# Altium footprint library FTP.PcbLib: 207 footprints (part 5 of 13)
Each footprint in its own frame and in the unit in brackets; x right, y up, seen from the top. Pads: shape width x height; smd on the part's side, far side on the other; paste and mask are expansions set on the pad; w line width, h text height; cw(c..) or ccw(c..) is an arc to the next point about the centre after c.
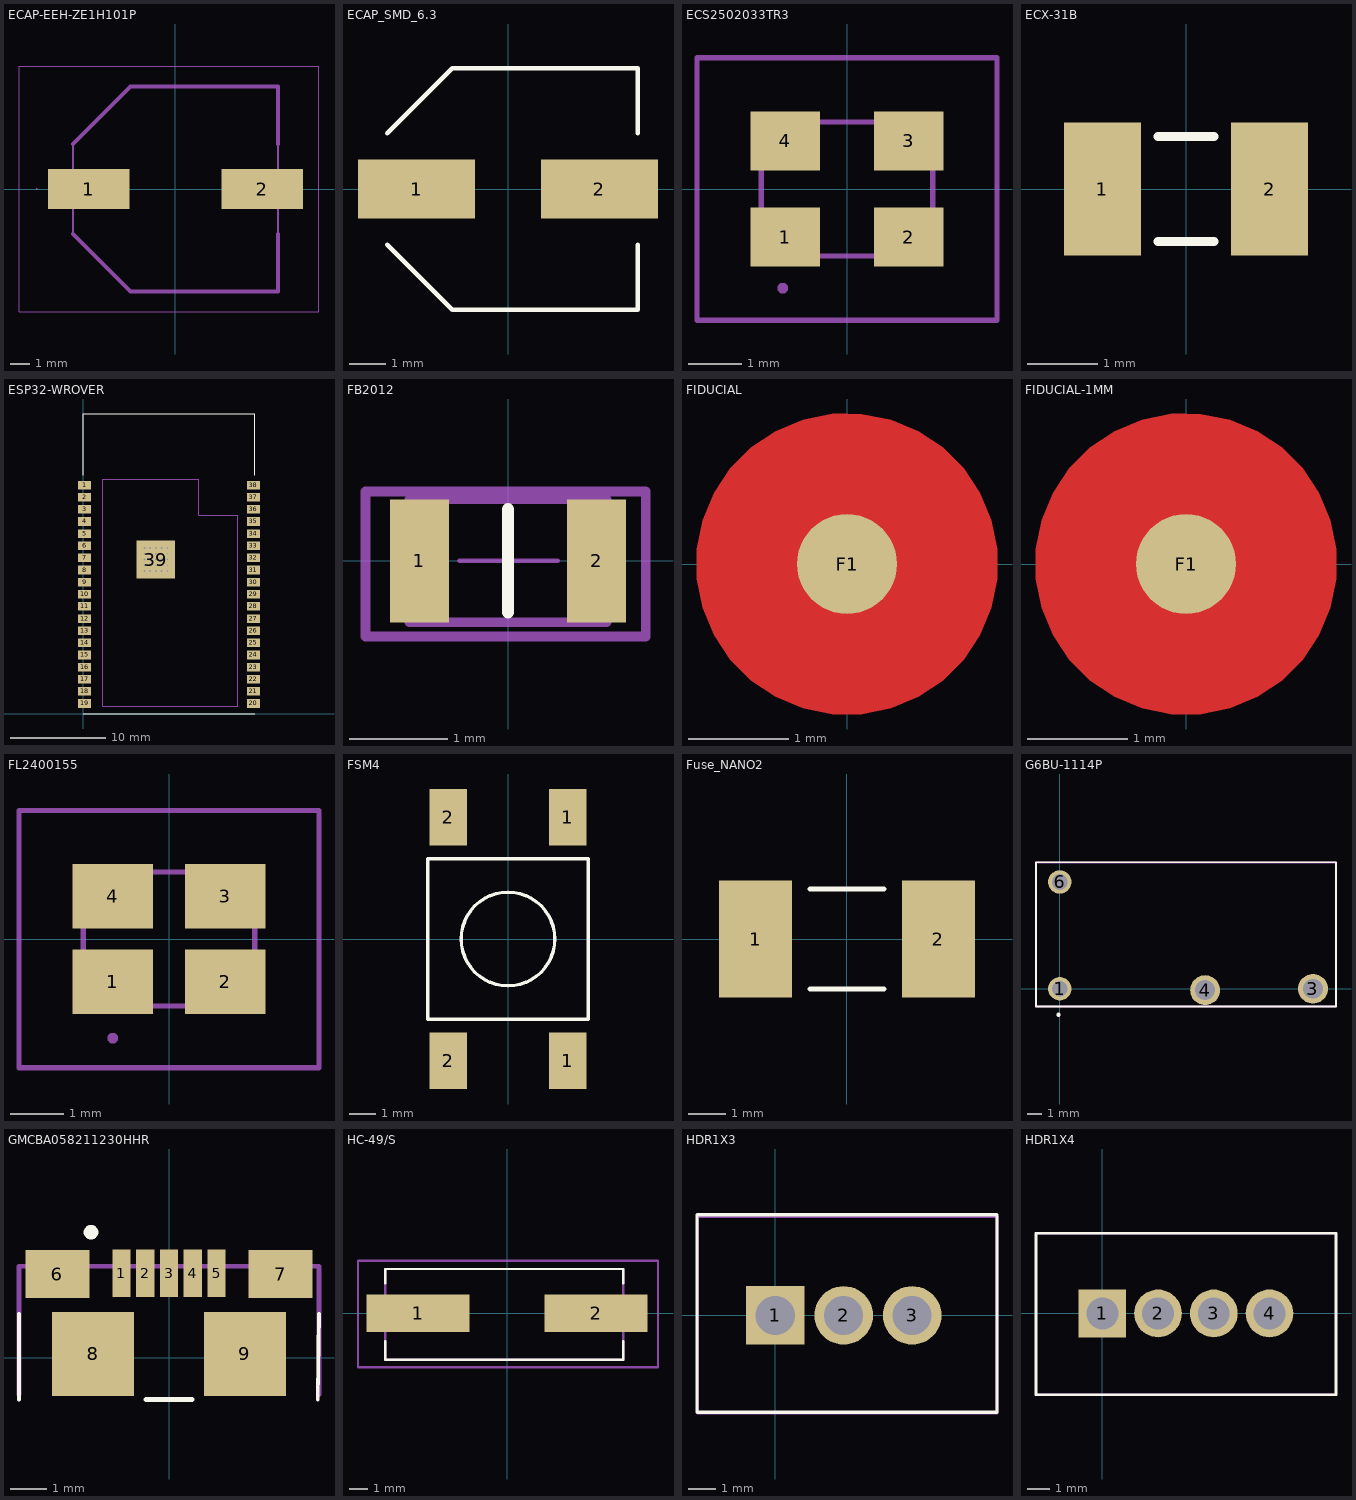
[diagram p4: the footprints below, top view; thin cyan lines are the x and y axes]

## ECAP-EEH-ZE1H101P [mm]
pads (2):
  rect 4.1x2 smd: 1(-4.35,0) 2(4.35,0)
3D Body Bottom:
  lines w0.05: -6.975,0 ccw(c-6.95,0) -6.925,0 ccw(c-6.95,0) -6.975,0
  lines w0.2: -5.15,-2.25 -2.25,-5.15 5.15,-5.15 5.15,-2.25 ; -5.15,2.25 -2.25,5.15 4.5,5.15 5.15,5.15 5.15,2.25
Bottom Assembly:
  lines w0.05: -7.85,-6.15 7.2,-6.15 7.2,6.15 -7.85,6.15 -7.85,-6.15
  lines w0.1: -5.15,2.25 -2.25,5.15 ; -5.15,2.25 -5.15,-2.25 -2.25,-5.15 5.15,-5.15 5.15,5.15 -2.25,5.15 ; -5.15,2.25 -2.25,5.15
3D body "PanasonicRadialCanSizeE.STEP": height 6.2, standoff -0.05, extent -4.246,-4.15 4.754,4.15

## ECAP_SMD_6.3 [mm]
pads (2):
  rect 3.2x1.6 smd: 1(-2.5,0) 2(2.5,0)
Top Overlay:
  lines w0.127: -3.3,-1.526 -1.526,-3.3 3.55,-3.3 3.55,-1.524 ; -3.3,1.526 -1.526,3.3 3.55,3.3 3.55,1.524
3D body "CAPSMD6_3x3_9.STEP": height 3.91, standoff 0, extent -3.48,-3.3 3.52,3.3

## ECS2502033TR3 [mm]
pads (4):
  rect 1.3x1.1 smd: 1(-1.15,-0.9) 2(1.15,-0.9) 3(1.15,0.9) 4(-1.15,0.9)
Assembly Bottom:
  lines w0.1: -2.8,-2.45 2.8,-2.45 2.8,2.45 -2.8,2.45 -2.8,-2.45 ; -1.6,-1.25 1.6,-1.25 1.6,1.25 -1.6,1.25 -1.6,-1.25
3D Body Bottom:
  lines w0.1: -1.2,-1.9 cw(c-1.2,-1.85) -1.2,-1.8 cw(c-1.2,-1.85) -1.2,-1.9
3D body "ECS-250-20-33-TR3.stp": height 0.9, standoff 0, extent -1.69,-1.34 1.69,1.34

## ECX-31B [mm]
pads (2):
  rect 1.1x1.9 smd mask+0.05: 1(-1.194,0) 2(1.194,0)
Top Overlay:
  lines w0.127: -0.4,-0.75 0.4,-0.75 ; -0.4,0.75 0.4,0.75
3D body "User Library-ECX-31B.STEP": height 0.9, standoff 0, extent -1.6,-0.737 1.6,0.764

## ESP32-WROVER [mm]
pads (64):
  rect 1.35x0.9 smd mask+0.07: 1(0.175,23.96) 2(0.175,22.69) 3(0.175,21.42) 4(0.175,20.15) 5(0.175,18.88) 6(0.175,17.61) 7(0.175,16.34) 8(0.175,15.07) 9(0.175,13.8) 10(0.175,12.53) 11(0.175,11.26) 12(0.175,9.99) 13(0.175,8.72) 14(0.175,7.45) 15(0.175,6.18) 16(0.175,4.91) 17(0.175,3.64) 18(0.175,2.37) 19(0.175,1.1) 20(17.825,1.1) 21(17.825,2.37) 22(17.825,3.64) 23(17.825,4.91) 24(17.825,6.18) 25(17.825,7.45) 26(17.825,8.72) 27(17.825,9.99) 28(17.825,11.26) 29(17.825,12.53) 30(17.825,13.8) 31(17.825,15.07) 32(17.825,16.34) 33(17.825,17.61) 34(17.825,18.88) 35(17.825,20.15) 36(17.825,21.42) 37(17.825,22.69) 38(17.825,23.96)
  round 0.3 hole 0.2 mask+0.07: 39(6.42,14.97) 39(6.42,15.57) 39(6.42,16.17) 39(6.42,16.77) 39(6.42,17.37) 39(7.02,14.97) 39(7.02,15.57) 39(7.02,16.17) 39(7.02,16.77) 39(7.02,17.37) 39(7.62,14.97) 39(7.62,15.57) 39(7.62,16.17) 39(7.62,16.77) 39(7.62,17.37) 39(8.22,14.97) 39(8.22,15.57) 39(8.22,16.17) 39(8.22,16.77) 39(8.22,17.37) 39(8.82,14.97) 39(8.82,15.57) 39(8.82,16.17) 39(8.82,16.77) 39(8.82,17.37)
  rect 4x4 smd mask+0.07: 39(7.62,16.17)
Top Overlay:
  lines w0.127: 0,0 18,0 ; 0,25 0,31.4 18,31.4 18,25
Mechanical 13:
  lines w0.127: 2.057,0.813 16.18,0.813 16.18,20.777 12.09,20.777 12.09,24.587 2.057,24.587 2.057,0.813
3D body "ESP32-WROVER-I--3DModel-STEP-56544.STEP": height 3.65, standoff 0, extent 0,0 18,31.4

## FB2012 [mm]
pads (2):
  rect 0.6x1.25 smd: 1(-0.9,0) 2(0.9,0)
Top Overlay:
  lines w0.127: 0,-0.525 0,0.525
Mechanical 13:
  lines w0.1: -1,-0.625 -1,0.625 1,0.625 1,-0.625 -1,-0.625
Mechanical 15:
  lines w0.05: -0.494,0 0.506,0 ; 0.006,-0.5 0.006,0.5
  lines w0.1: -1.449,-0.769 -1.449,0.704 1.4,0.704 1.4,-0.769 -1.449,-0.769
3D body "User Library-User Library-0805_Res1.STEP": height 0.8, standoff 0, extent -1.4,-0.625 1.4,0.625

## FIDUCIAL [mm] "1MM FIDUCAL MARKER"
pads (1):
  round 1 smd paste-1 mask+0.5: F1(0,0)
Top Layer:
  pour cut-out: -1.5,0 -1.5,-0.148 -1.442,-0.438 -1.329,-0.711 -1.165,-0.956 -0.956,-1.165 -0.711,-1.329 -0.438,-1.442 -0.148,-1.5 0,-1.5 0.148,-1.5 0.438,-1.442 0.711,-1.329 0.956,-1.165 1.165,-0.956 1.329,-0.711 1.442,-0.438 1.5,-0.148 1.5,0 1.5,0.148 1.442,0.438 1.329,0.711 1.165,0.956 0.956,1.165 0.711,1.329 0.438,1.442 0.148,1.5 0,1.5 -0.148,1.5 -0.438,1.442 -0.711,1.329 -0.956,1.165 -1.165,0.956 -1.329,0.711 -1.442,0.438 -1.5,0.148

## FIDUCIAL-1MM [mm] "1MM FIDUCAL MARKER"
pads (1):
  round 1 smd paste-1 mask+0.5: F1(0,0)
Top Layer:
  pour cut-out: -1.5,0 -1.5,-0.148 -1.442,-0.438 -1.329,-0.711 -1.165,-0.956 -0.956,-1.165 -0.711,-1.329 -0.438,-1.442 -0.148,-1.5 0,-1.5 0.148,-1.5 0.438,-1.442 0.711,-1.329 0.956,-1.165 1.165,-0.956 1.329,-0.711 1.442,-0.438 1.5,-0.148 1.5,0 1.5,0.148 1.442,0.438 1.329,0.711 1.165,0.956 0.956,1.165 0.711,1.329 0.438,1.442 0.148,1.5 0,1.5 -0.148,1.5 -0.438,1.442 -0.711,1.329 -0.956,1.165 -1.165,0.956 -1.329,0.711 -1.442,0.438 -1.5,0.148

## FL2400155 [mil]
pads (4):
  rect 59.06x47.24 smd: 1(-41.34,-31.5) 2(41.34,-31.5) 3(41.34,31.5) 4(-41.34,31.5)
Assembly Bottom:
  lines w3.94: -110.24,-94.49 -110.24,94.49 110.24,94.49 110.24,-94.49 -110.24,-94.49 ; -62.99,-49.21 -62.99,49.21 62.99,49.21 62.99,-49.21 -62.99,-49.21
3D Body Bottom:
  lines w3.94: -41.34,-74.8 ccw(c-41.34,-72.83) -41.34,-70.87 ccw(c-41.34,-72.83) -41.34,-74.8
3D body "FL2400155.stp": height 34.65, standoff 0, extent -66.14,-50.39 66.14,50.39

## FSM4 [mm]
pads (4):
  rect 1.4x2.1 smd mask+0.07: 1(2.23,-4.55) 1(2.23,4.55) 2(-2.23,-4.55) 2(-2.23,4.55)
Top Overlay:
  circle w0.127: c0,0 r1.75
  lines w0.127: -3,-3 3,-3 3,3 -3,3 -3,-3
3D body "c-4-1437565-2-s-3d.stp": height 5.1, standoff 0.02, extent -3,-5 3,5

## Fuse_NANO2 [mm]
pads (2):
  rect 1.96x3.15 smd mask+0.07: 1(-2.455,0) 2(2.455,0)
Top Overlay:
  lines w0.127: -1,-1.345 1,-1.345 ; -1,1.345 1,1.345
3D body "User Library-FUSE_NANO2.step": height 2.7, standoff 0, extent -3.05,-1.35 3.05,1.35

## G6BU-1114P [mm]
height 15.3
pads (4):
  round 1.65 hole 1.1: 1(0,0) 6(0,7.5)
  round 2.1 hole 1.4: 3(17.775,0) 4(10.2,-0.1)
Top Overlay:
  circle w0.152: c-0.095,-1.82 r0.076
  lines w0.127: -1.675,-1.25 -1.675,8.883 19.387,8.883 19.39,8.886 19.39,-1.25 -1.675,-1.25
Mechanical 13:
  lines w0.127: -1.675,-1.25 -1.675,8.875 19.39,8.875 19.39,-1.25 -1.675,-1.25
Mechanical 15:
  lines w0.127: -1.675,-1.25 19.39,-1.25 19.39,8.875 19.382,8.883 -1.675,8.883 -1.675,-1.25
3D body "G6BU_1114P_US.step": height 10, standoff -3.5, extent -1.61,-1.19 19.39,8.81

## GMCBA058211230HHR [mm]
pads (9):
  rect 0.5x1.3 smd: 1(-1.3,2.304) 2(-0.65,2.304) 3(0,2.304) 4(0.65,2.304) 5(1.3,2.304)
  rect 1.75x1.3 smd: 6(-3.048,2.286) 7(3.048,2.286)
  rect 2.25x2.3 smd: 8(-2.075,0.1) 9(2.075,0.1)
Top Overlay:
  lines w0.1: -4.1,-1.143 -4.1,1.2 ; 4.064,-1.143 4.1,1.2
  lines w0.125: -0.635,-1.143 0.635,-1.143
  lines w0.2: -2.232,3.429 ccw(c-2.132,3.429) -2.032,3.429 ccw(c-2.132,3.429) -2.232,3.429
Mechanical 15:
  lines w0.125: -4.1,-1.016 -4.1,2.5 4.1,2.5 4.1,-1.016
3D body "gmcba058xx1230hhr.STEP": height 3.77, standoff -0.03, extent -4.1,-2.433 4.1,2.667

## HC-49/S [mm]
pads (2):
  rect 5.5x2 smd paste-0.025 mask+0.07: 1(-4.75,0) 2(4.75,0)
Top Overlay:
  lines w0.127: -6.5,-1.5 -6.5,-2.5 6.2,-2.5 6.2,-1.5 ; -6.5,1.6 -6.5,2.35 6.2,2.35 6.2,1.6
Mechanical 13:
  lines w0.127: -6.5,-2.5 -6.5,2.35 6.2,2.35 6.2,-2.5 -6.5,-2.5
Mechanical 15:
  lines w0.127: -7.95,-2.9 -7.95,2.8 8.05,2.8 8.05,-2.9 -7.95,-2.9
  text "+" at -0.507,-0.749 h1.5
3D body "SM49.stp": height 4.2, standoff 0, extent -6.5,-2.5 6.2,2.35

## HDR1X3 [mm]
pads (3):
  rect 2.175x2.175 / inner round 2.175 / far side rect 2.175x2.175 hole 1.45: 1(0,0)
  round 2.175 hole 1.45: 2(2.54,0) 3(5.08,0)
Top Overlay:
  lines w0.125: -2.9,-3.6 -2.9,3.725 8.225,3.725 8.225,-3.6 -2.9,-3.6
Mechanical 15:
  lines w0.1: -2.875,-3.625 8.225,-3.625 8.225,3.654 -2.875,3.654 -2.875,-3.625
3D body "90136-1103.stp": height 10.85, standoff -2.95, extent -2.818,-3.556 8.152,3.654

## HDR1X4 [mm]
pads (4):
  rect 2.175x2.175 / inner round 2.175 / far side rect 2.175x2.175 hole 1.45: 1(0,0)
  round 2.175 hole 1.45: 2(2.54,0) 3(5.08,0) 4(7.62,0)
Top Overlay:
  lines w0.125: -3.025,-3.705 -3.025,3.65 10.65,3.65 10.65,-3.705 -3.025,-3.705
Mechanical 15:
  lines w0.1: -3.025,-3.705 10.65,-3.705 10.65,3.65 -3.025,3.65 -3.025,-3.705
3D body "90136-1204.stp": height 10.95, standoff -2.85, extent -2.945,-3.651 10.565,3.559